# Altium schematic symbol library Ic%.SchLib: 452 symbols (part 5 of 12)
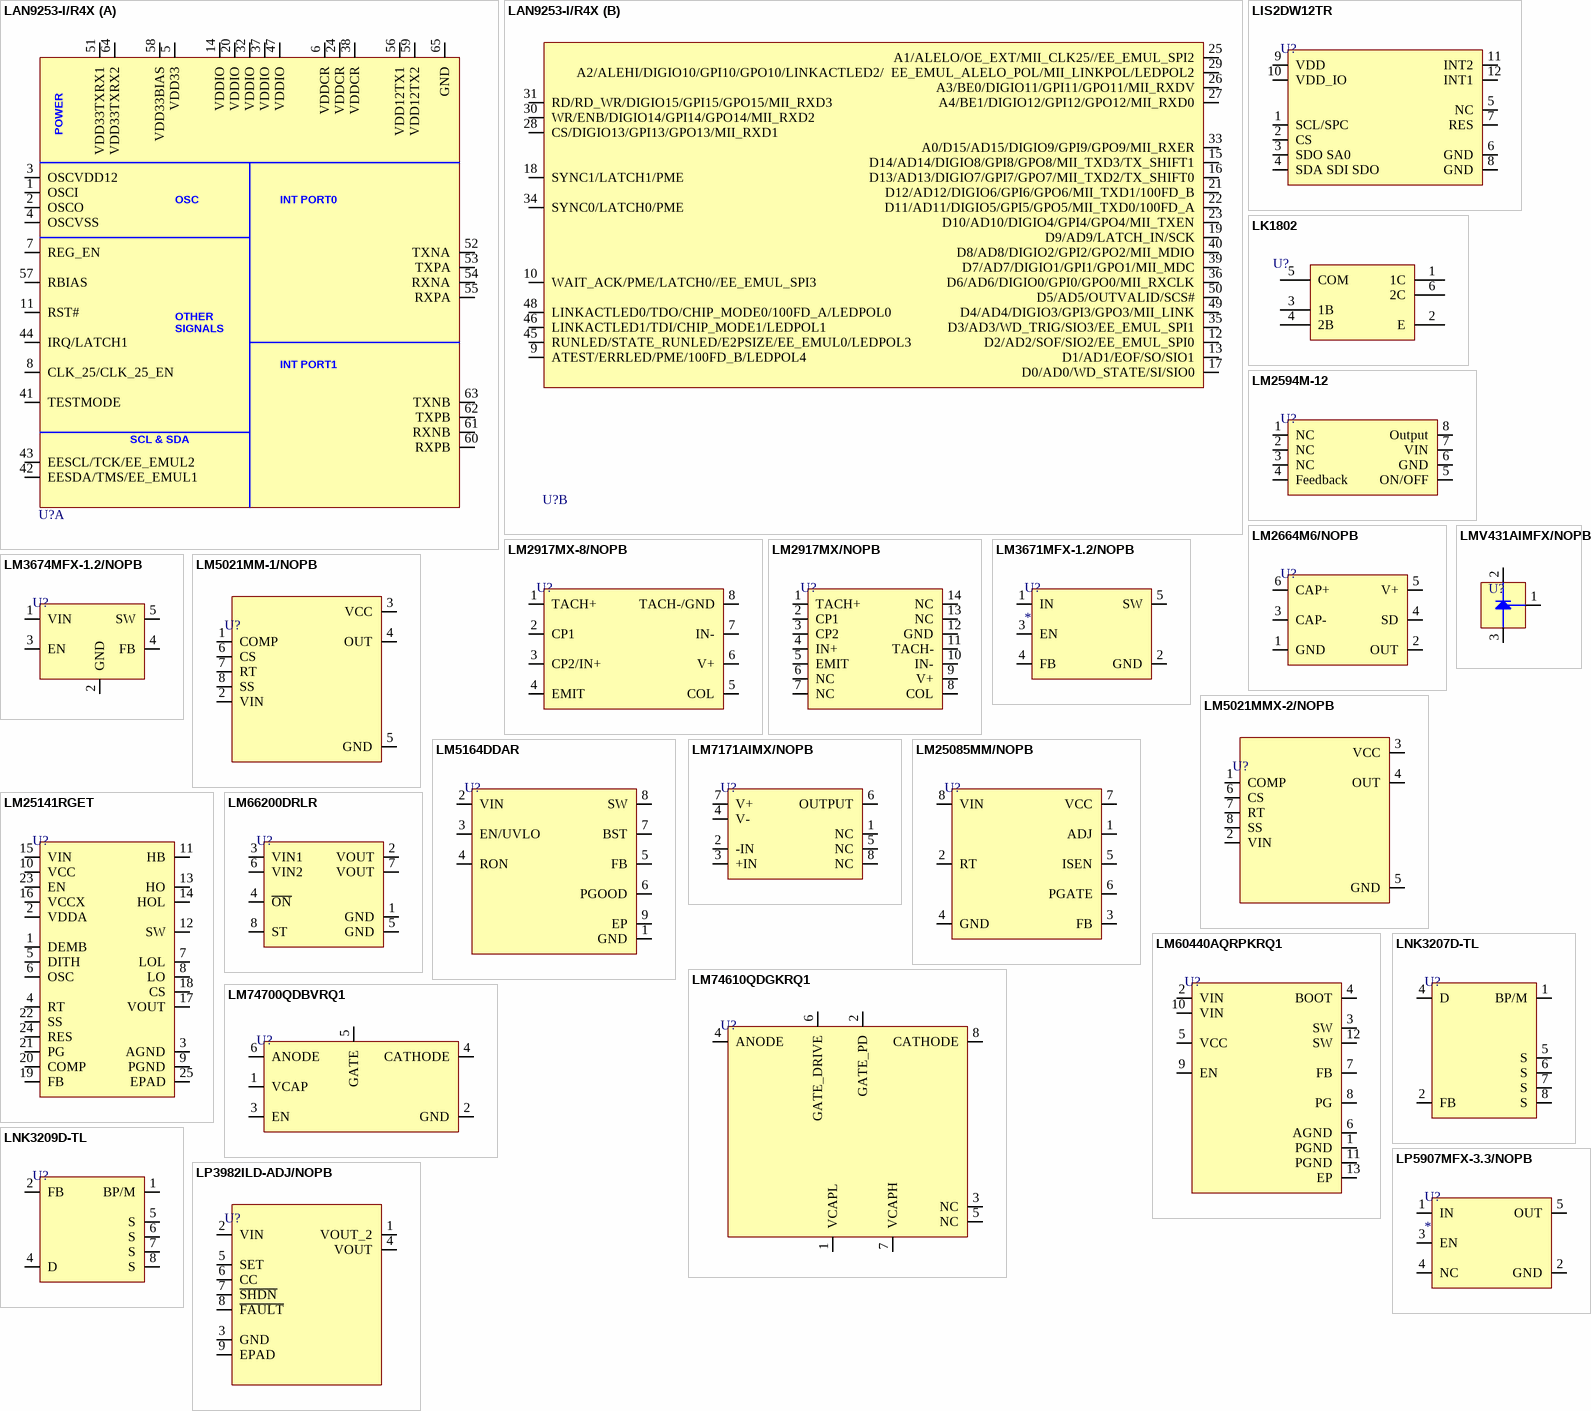
[diagram p27: symbols LAN9253-I/R4X to LP5907MFX-3.3/NOPB]

## LM5021MM-1/NOPB
designator U?
IC OFFLINE SW MULT TOP 8VSSOP; Manufacturer: TI National Semiconductor; Manufacturer Part Number: LM5021MM-1/NOPB; Frequency: 500kHz; Output Voltage: 600mV; Output Current: 100mA; Switching Frequency: 1MHz; Quiescent Current: 2.5mA; Topology: Flyback; Max Supply Voltage: 30V; Min Supply Voltage: 8V; Rise Time: 25ns; Fall Time: 10ns; Duty Cycle: 80%; Nominal Supply Voltage: 15V; Supplier: Mouser; LCSC Part Number: C202233; RoHS: Yes; Item Type: IC; Stock: 1237; Pricing: 1=1.4, 10=1.04, 50=1.04, 100=0.968, 1000=0.887, 10000=0.856 (USD); Mounting Technology: Surface Mount; Case/Package: MSOP; Pins: 8; Min Operating Temperature: -40°C; Max Operating Temperature: 125°C; Packaging: Tape and Reel; Termination: SMD/SMT; Series: -; Thickness: 970um; Reach SVHC Compliant: No; Lead Free: Lead Free; RoHS Compliant: Yes; ComponentLink1URL: https://datasheet.ciiva.com/1513/1771307-1513330.pdf?src-supplier=Element14; ComponentLink1Description: https://datasheet.ciiva.com/1513/1771307-1513330.pdf?src-supplier=Element14; ComponentLink2URL: https://datasheet.ciiva.com/49118/1767118-49118582.pdf?src-supplier=Element14; ComponentLink2Description: https://datasheet.ciiva.com/49118/1767118-49118582.pdf?src-supplier=Element14; ComponentLink3URL: https://datasheet.ciiva.com/49118/1767118-49118263.pdf?src-supplier=Element14; ComponentLink3Description: https://datasheet.ciiva.com/49118/1767118-49118263.pdf?src-supplier=Element14; ComponentLink4URL: https://datasheet.ciiva.com/46389/1888908-46389836.pdf?src-supplier=Element14; ComponentLink4Description: https://datasheet.ciiva.com/46389/1888908-46389836.pdf?src-supplier=Element14; ComponentLink5URL: https://datasheet.ciiva.com/6613/lm5021-6613338.pdf?src-supplier=Digikey; ComponentLink5Description: https://datasheet.ciiva.com/6613/lm5021-6613338.pdf?src-supplier=Digikey; ComponentLink6URL: https://datasheet.ciiva.com/6613/lm5021-6613340.pdf?src-supplier=Digikey; ComponentLink6Description: https://datasheet.ciiva.com/6613/lm5021-6613340.pdf?src-supplier=Digikey; ComponentLink7URL: https://datasheet.ciiva.com/6613/lm5021-6613336.pdf?src-supplier=Digikey; ComponentLink7Description: https://datasheet.ciiva.com/6613/lm5021-6613336.pdf?src-supplier=Digikey
footprint 8-VSSOP (Pitch 0.65mm)(5x3.1mm)
pins: 1 COMP, 2 VIN, 3 VCC, 4 OUT, 5 GND, 6 CS, 7 RT, 8 SS

## LM5021MMX-2/NOPB
designator U?
IC OFFLINE SW MULT TOP 8VSSOP; Manufacturer: TI National Semiconductor; Manufacturer Part Number: LM5021MMX-2/NOPB; Number of Channels: 1NUMBER; Supplier: Mouser; LCSC Part Number: C2865463; RoHS: Yes; Item Type: IC; Stock: 755; Pricing: 1=1.65, 10=1.58, 50=1.46, 100=1.21, 1000=0.859, 10000=0.736 (USD); Length: 3mm; Width: 3mm; Thickness: 970um; Lead Free: 5697LeadFree; ComponentLink1URL: https://datasheet.ciiva.com/12228/snvs359c-123045-12228593.pdf?src-supplier=Mouser; ComponentLink1Description: https://datasheet.ciiva.com/12228/snvs359c-123045-12228593.pdf?src-supplier=Mouser; ComponentLink2URL: https://datasheet.ciiva.com/6612/lm5021-6612842.pdf?src-supplier=Digikey; ComponentLink2Description: https://datasheet.ciiva.com/6612/lm5021-6612842.pdf?src-supplier=Digikey
footprint 8-VSSOP (Pitch 0.65mm)(5x3.1mm)
pins: 1 COMP, 2 VIN, 3 VCC, 4 OUT, 5 GND, 6 CS, 7 RT, 8 SS

## LM5164DDAR
designator U?
IC REG BUCK ADJ 1A 8SOPWR; Manufacturer: Texas Instruments; Manufacturer Part Number: LM5164DDAR; Max Duty Cycle: 99%; Max Supply Voltage: 100V; Min Supply Voltage: 6V; Nominal Supply Current: 600uA; Number of Channels: 1NUMBER; Switching Frequency: 1MHz; Supplier: Mouser; LCSC Part Number: C477928; RoHS: Yes; Item Type: IC; Stock: 1957; Pricing: 1=3.78, 10=3.22, 50=3.22, 100=2.79, 1000=2, 10000=1.88 (USD); Pins: 8NUMBER; Min Operating Temperature: -40°C; Max Operating Temperature: 150°C; Number of Outputs: 1NUMBER; Output Current: 1A; Length: 4.89mm; Width: 3.9mm; Height: 1.7mm; Thickness: 1.48mm
footprint 8-SO-EP_
pins: 1 GND, 2 VIN, 3 EN/UVLO, 4 RON, 5 FB, 6 PGOOD, 7 BST, 8 SW, 9 EP

## LM7171AIMX/NOPB
designator U?
Very High Speed, High Output Current, Voltage Feedback Amplifier 8-SOIC -40 to 85; Manufacturer: TI National Semiconductor; Manufacturer Part Number: LM7171AIMX/NOPB; Item Type: IC; Supplier: Mouser; Supplier Part Number: 926-LM7171AIMX/NOPB; RoHS: Yes; Category: Amplifiers - Op Amps, Buffer, Instrumentation; Stock: 853; Pricing: 1=4.79, 10=4.22, 50=4.22, 100=3.58, 1000=2.61, 10000=2.51 (USD); ComponentLink1URL: https://datasheet.ciiva.com/6627/lm7171-6627136.pdf?src-supplier=Digi-Key; ComponentLink1Description: https://datasheet.ciiva.com/6627/lm7171-6627136.pdf?src-supplier=Digi-Key; ComponentLink2URL: https://datasheet.ciiva.com/6627/lm7171-6627103.pdf?src-supplier=Digi-Key; ComponentLink2Description: https://datasheet.ciiva.com/6627/lm7171-6627103.pdf?src-supplier=Digi-Key
footprint SOIC-8(0.154", 3.90mm Width)
pins: 1 NC, 2 -IN, 3 +IN, 4 V-, 5 NC, 6 OUTPUT, 7 V+, 8 NC

## LM25085MM/NOPB
designator U?
IC REG CTRLR BUCK 8VSSOP; Manufacturer: TI National Semiconductor; Manufacturer Part Number: LM25085MM/NOPB; Supplier: Mouser; Supplier Part Number: 926-LM25085MM/NOPB; RoHS: Yes; Item Type: IC; Stock: 2383; Pricing: 1=2.42, 10=2.06, 50=2.06, 100=1.75, 1000=1.1, 10000=1.03 (USD); ComponentLink1URL: https://datasheet.ciiva.com/6598/lm25085-6598301.pdf?src-supplier=Digikey; ComponentLink1Description: https://datasheet.ciiva.com/6598/lm25085-6598301.pdf?src-supplier=Digikey; ComponentLink2URL: https://datasheet.ciiva.com/6598/lm25085-6598310.pdf?src-supplier=Digikey; ComponentLink2Description: https://datasheet.ciiva.com/6598/lm25085-6598310.pdf?src-supplier=Digikey; LCSC Part Number: C66537
footprint 8-VSSOP (Pitch 0.65mm)(5x3.1mm)
pins: 1 ADJ, 2 RT, 3 FB, 4 GND, 5 ISEN, 6 PGATE, 7 VCC, 8 VIN

## LM25141RGET
designator U?
LOW VOLTAGE LM5141- SYNC BUCK CO; Manufacturer: Texas Instruments; Manufacturer Part Number: LM25141RGET; Item Type: IC; Supplier: Digikey; LCSC Part Number: C2658130; RoHS: Yes; Stock: 976; Pricing: 1=6.33, 10=5.685, 25=5.3744, 100=4.6579 (USD); ComponentLink1URL: http://www.ti.com/lit/ds/symlink/lm25141.pdf?src-supplier=Farnell; ComponentLink1Description: http://www.ti.com/lit/ds/symlink/lm25141.pdf?src-supplier=Farnell; ComponentLink2URL: http://www.ti.com/general/docs/suppproductinfo.tsp?distId=10&gotoUrl=http%3A%2F%2Fwww.ti.com%2Flit%2Fgpn%2Flm25141&src-supplier=Digikey; ComponentLink2Description: http://www.ti.com/general/docs/suppproductinfo.tsp?distId=10&gotoUrl=http%3A%2F%2Fwww.ti.com%2Flit%2Fgpn%2Flm25141&src-supplier=Digikey
footprint 24-WQFN (4x4)
pins: 1 DEMB, 2 VDDA, 3 AGND, 4 RT, 5 DITH, 6 OSC, 7 LOL, 8 LO, 9 PGND, 10 VCC, 11 HB, 12 SW, 13 HO, 14 HOL, 15 VIN, 16 VCCX, 17 VOUT, 18 CS, 19 FB, 20 COMP, 21 PG, 22 SS, 23 EN, 24 RES, 25 EPAD

## LM60440AQRPKRQ1
designator U?
IC REG BUCK ADJ 4A 13WQFN; Manufacturer: Texas Instruments; Manufacturer Part Number: LM60440AQRPKRQ1; Supplier: Mouser; LCSC Part Number: C3187981; RoHS: Yes; Item Type: IC; Stock: 916; Pricing: 1=2.79, 10=1.91, 50=1.91, 100=1.71, 1000=1.52, 10000=1.45 (USD)
footprint 13-WQFN-HR (3x2)
pins: 1 PGND, 2 VIN, 3 SW, 4 BOOT, 5 VCC, 6 AGND, 7 FB, 8 PG, 9 EN, 10 VIN, 11 PGND, 12 SW, 13 EP

## LM66200DRLR
designator U?
OR Controller N+1 ORing Controller N-Channel 2:1 SOT-583; Manufacturer: Texas Instruments; Manufacturer Part Number: LM66200DRLR; Item Type: IC; Supplier 1: Mouser; RoHS: No; Category: Integrated Circuits (ICs); Stock 1: 11717; Pricing 1: 1=0.80000, 10=0.70000, 50=0.65800, 100=0.53700, 1000=0.34000, 10000=0.30700 (USD); Supplier Part Number 1: 595-LM66200DRLR; LCSC Part Number: C3235556
footprint SOT-583
pins: 1 GND, 2 VOUT, 3 VIN1 , 4 ~{ON} , 5 GND, 6 VIN2, 7 VOUT, 8 ST

## LM74610QDGKRQ1
designator U?
IC SMART DIODE CTLR 8VSSOP; Manufacturer: Texas Instruments; Manufacturer Part Number: LM74610QDGKRQ1; Quiescent Current: 0pA; Operating Supply Current: 0A; Supplier: Mouser; Supplier Part Number: 595-LM74610QDGKRQ1; RoHS: Yes; Category: Power Management ICs; Stock: 4920; Pricing: 1=2.47, 10=2.1, 50=2.1, 100=1.79, 1000=1.2, 10000=1.08 (USD); Mounting Technology: Surface Mount; Case/Package: VSSOP; Pins: 8; Weight: 0.005997oz; Min Operating Temperature: -40°C; Max Operating Temperature: 125°C; Packaging: Cut Tape; Series: Automotive, AEC-Q100; Package Quantity: 2500; Lead Free: Lead Free; RoHS Compliant: Yes; ComponentLink1URL: http://www.ti.com/lit/ds/symlink/lm74610-q1.pdf?src-supplier=Digikey; ComponentLink1Description: http://www.ti.com/lit/ds/symlink/lm74610-q1.pdf?src-supplier=Digikey; Item Type: IC
footprint 8-VSSOP (Pitch 0.65mm)(5x3.1mm)
pins: 1 VCAPL, 2 GATE_PD, 3 NC, 4 ANODE, 5 NC, 6 GATE_DRIVE, 7 VCAPH, 8 CATHODE

## LM74700QDBVRQ1
designator U?
OR Controller N+1 ORing Controller N-Channel 1:1 SOT-23-6; Manufacturer: Texas Instruments; Manufacturer Part Number: LM74700QDBVRQ1; Max Output current: 5A; Turn-On Delay Time: 1.4us; Turn-Off Delay Time: 450ns; Max Supply Voltage: 65V; Min Supply Voltage: 3.2V; Nominal Supply Current: 80uA; Number of Outputs: 1NUMBER; Item Type: IC; Supplier: Mouser; Supplier Part Number: 595-LM74700QDBVRQ1; RoHS: Yes; Category: Power Management ICs; Stock: 11505; Pricing: 1=1.78, 10=1.6, 50=1.6, 100=1.28, 1000=0.877, 10000=0.756 (USD); Mounting Technology: Surface Mount; Case/Package: SOT-23-6; Pins: 6NUMBER; Min Operating Temperature: -40°C; Max Operating Temperature: 125°C; Series: Automotive, AEC-Q100; Length: 2.9mm; Width: 1.6mm; Height: 1.45mm; Thickness: 1.2mm; RoHS Compliant: Yes; ComponentLink1URL: http://www.ti.com/general/docs/suppproductinfo.tsp?distId=10&amp;gotoUrl=http%3A%2F%2Fwww.ti.com%2Flit%2Fgpn%2Flm74700-q1&src-supplier=Digikey; ComponentLink1Description: http://www.ti.com/general/docs/suppproductinfo.tsp?distId=10&amp;gotoUrl=http%3A%2F%2Fwww.ti.com%2Flit%2Fgpn%2Flm74700-q1&src-supplier=Digikey; LCSC Part Number: C2941042
footprint SOT-23-6
pins: 1 VCAP, 2 GND, 3 EN, 4 CATHODE, 5 GATE, 6 ANODE

## LMV431AIMFX/NOPB
designator U?
IC VREF SHUNT ADJ 1% SOT23-3; Manufacturer: TI National Semiconductor; Manufacturer Part Number: LMV431AIMFX/NOPB; Supplier: Mouser; LCSC Part Number: C478069; RoHS: Yes; Item Type: IC; Stock: 22360; Pricing: 1=0.68, 10=0.561, 50=0.561, 100=0.425, 1000=0.29, 10000=0.24 (USD); ComponentLink1URL: https://datasheet.ciiva.com/2012/lmv431-2012949.pdf?src-supplier=Digikey; ComponentLink1Description: https://datasheet.ciiva.com/2012/lmv431-2012949.pdf?src-supplier=Digikey; ComponentLink2URL: https://datasheet.ciiva.com/2012/lmv431-2012950.pdf?src-supplier=Digikey; ComponentLink2Description: https://datasheet.ciiva.com/2012/lmv431-2012950.pdf?src-supplier=Digikey; ComponentLink3URL: https://datasheet.ciiva.com/6596/lmv431-6596021.pdf?src-supplier=Digikey; ComponentLink3Description: https://datasheet.ciiva.com/6596/lmv431-6596021.pdf?src-supplier=Digikey; ComponentLink4URL: https://datasheet.ciiva.com/46424/1841927-46424699.pdf?src-supplier=Element14; ComponentLink4Description: https://datasheet.ciiva.com/46424/1841927-46424699.pdf?src-supplier=Element14
footprint SOT-23 (TRANS NPN 40V 0.6A SOT23)
pins: 1 REF, 2 Cathode, 3 Anode

## LNK3207D-TL
designator U?
IC OFFLINE SWITCH MULT TOP 8SO; Manufacturer: Power Integrations; Manufacturer Part Number: LNK3207D-TL; Supplier: Rs; Supplier Part Number: 2232976; RoHS: No; Category: Voltage Regulators - Switching; Stock: 240; Pricing: 5=1.206, 50=1.026, 100=0.864, 250=0.818, 1000=0.594 (GBP); Item Type: IC
footprint SO-8C
pins: 1 BP/M, 2 FB, 4 D, 5 S, 6 S, 7 S, 8 S

## LNK3209D-TL
designator U?
600 MA (MDCM) 1000 MA (CCM); Manufacturer: Power Integrations; Manufacturer Part Number: LNK3209D-TL; Supplier: Future Electronics; Supplier Part Number: 5168941; RoHS: No; Category: Uncategorized; Stock: 10; Pricing: 1=0.825, 15=0.74, 75=0.695, 250=0.665, 1250=0.61 (USD)
footprint SO-8C
pins: 1 BP/M, 2 FB, 4 D, 5 S, 6 S, 7 S, 8 S

## LP3982ILD-ADJ/NOPB
designator U?
IC REG LIN POS ADJ 300MA 8WSON; Manufacturer: TI National Semiconductor; Manufacturer Part Number: LP3982ILD-ADJ/NOPB; Item Type: Voltage Regulators - Linear; Supplier: Mouser; LCSC Part Number: C2868888; RoHS: Yes; Stock: 6952; Pricing: 1=0.57, 10=0.509, 50=0.509, 100=0.434, 1000=0.359, 10000=0.33 (USD); ComponentLink1URL: https://datasheet.ciiva.com/15111/getdatasheetpartid-121267-15111861.pdf?src-supplier=Verical; ComponentLink1Description: https://datasheet.ciiva.com/15111/getdatasheetpartid-121267-15111861.pdf?src-supplier=Verical; ComponentLink2URL: https://datasheet.ciiva.com/4886/snvs185c-123114-4886512.pdf?src-supplier=Mouser; ComponentLink2Description: https://datasheet.ciiva.com/4886/snvs185c-123114-4886512.pdf?src-supplier=Mouser; ComponentLink3URL: https://datasheet.ciiva.com/25626/0900766b810fa762-25626726.pdf?src-supplier=Rs; ComponentLink3Description: https://datasheet.ciiva.com/25626/0900766b810fa762-25626726.pdf?src-supplier=Rs; ComponentLink4URL: https://datasheet.ciiva.com/6579/lp3982-6579861.pdf?src-supplier=Digikey; ComponentLink4Description: https://datasheet.ciiva.com/6579/lp3982-6579861.pdf?src-supplier=Digikey; ComponentLink5URL: https://datasheet.ciiva.com/6579/lp3982-6579862.pdf?src-supplier=Digikey; ComponentLink5Description: https://datasheet.ciiva.com/6579/lp3982-6579862.pdf?src-supplier=Digikey; ComponentLink6URL: https://datasheet.ciiva.com/22732/1771562-22732394.pdf?src-supplier=Farnell; ComponentLink6Description: https://datasheet.ciiva.com/22732/1771562-22732394.pdf?src-supplier=Farnell; ComponentLink7URL: https://datasheet.ciiva.com/22678/1849842-22678007.pdf?src-supplier=Element14; ComponentLink7Description: https://datasheet.ciiva.com/22678/1849842-22678007.pdf?src-supplier=Element14; ComponentLink8URL: https://datasheet.ciiva.com/46384/1874654-46384191.pdf?src-supplier=Element14; ComponentLink8Description: https://datasheet.ciiva.com/46384/1874654-46384191.pdf?src-supplier=Element14
footprint 8-WSON (3x2.5)
pins: 1 VOUT_2, 2 VIN, 3 GND, 4 VOUT, 5 SET, 6 CC, 7 ~{SHDN}, 8 ~{FAULT}, 9 EPAD

## LP5907MFX-3.3/NOPB
designator U?
LDO Regulator Pos 3.3V 0.25A 5-Pin SOT-23 T/R; Manufacturer: Texas Instruments; Manufacturer Part Number: LP5907MFX-3.3/NOPB; Number of Outputs: 1; Min Input Voltage: 2.2V; Max Supply Voltage: 5.5V; Max Output current: 250mA; Dropout Voltage: 250mV; Polarity: Positive; Quiescent Current: 25uA; Accuracy: 2%; Power Supply Rejection Ratio (PSRR): 60dB; Output Type: Fixed; Max Supply Current: 425uA; Nominal Supply Current: 12uA; Number of Channels: 1NUMBER; Item Type: IC; Supplier: Digikey; Supplier Part Number: 296-38557-1-ND; RoHS: Yes; Category: Voltage Regulators - Linear; Stock: 22318; Pricing: 1=0.6, 10=0.512, 25=0.478, 100=0.3823, 250=0.35496, 500=0.30034, 1000=0.23209 (USD); Mounting Technology: Surface Mount; Case/Package: SOT-23-5; Pins: 5; Min Operating Temperature: -40°C; Max Operating Temperature: 125°C; Output Voltage: 3.3V; Packaging: Tape and Reel; Output Current: 250mA; Package Quantity: 3000; Number of Regulators: 1; Nominal Output Voltage: 3.3V; Series: -; Output Configuration: Positive; Min Supply Voltage: 2.2V; Length: 2.9mm; Width: 1.6mm; Height: 1.45mm; Thickness: 1.2mm; Radiation Hardening: No; Reach SVHC Compliant: No; Lead Free: Lead Free; RoHS Compliant: Yes; ComponentLink1URL: https://datasheet.ciiva.com/48475/lp5907-48475084.pdf?src-supplier=Avnet; ComponentLink1Description: https://datasheet.ciiva.com/48475/lp5907-48475084.pdf?src-supplier=Avnet; Package: SOT-23-5; JLCPCB Part Number: C80670; ComponentLink2Description: JLCPCB; ComponentLink2URL: https://jlcpcb.com/partdetail/TexasInstruments-LP5907MFX_3_3NOPB/C80670
footprint SOT-23-5
pins: 1 IN, 2 GND, 3 EN, 4 NC, 5 OUT

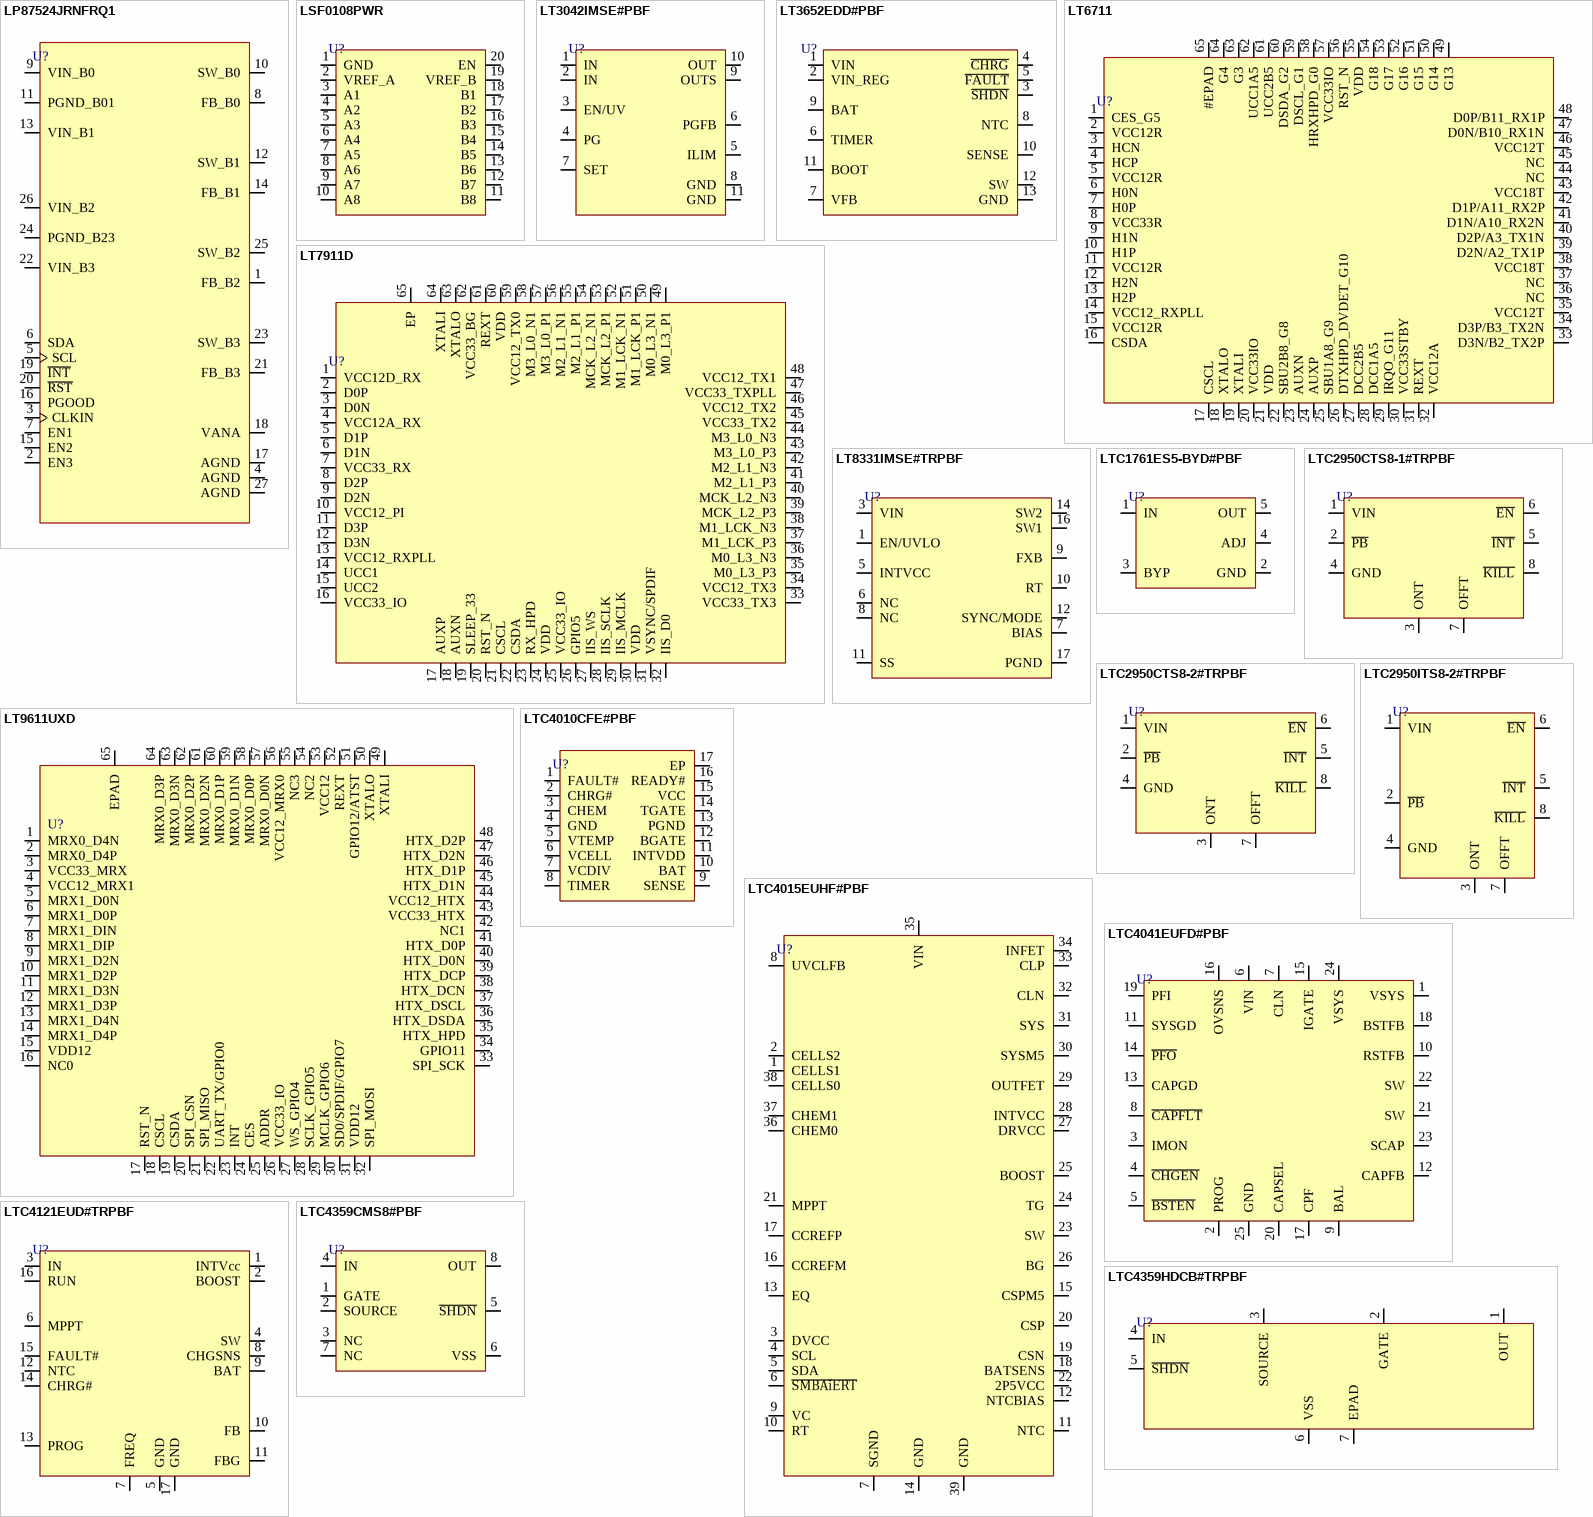
[diagram p9: symbols LP87524JRNFRQ1 to LTC4359HDCB#TRPBF]

## LP87524JRNFRQ1
designator U?
IC REG BUCK ADJ QUAD 26VQFN; Manufacturer: Texas Instruments; Manufacturer Part Number: LP87524JRNFRQ1; Supplier: Mouser; Supplier Part Number: 595-LP87524JRNFRQ1; RoHS: Yes; Item Type: IC; Stock: 3780; Pricing: 1=5.94, 10=5.2, 50=5.2, 100=4.37, 1000=3.14, 10000=2.91 (USD); Pins: 26NUMBER; Thickness: 900um; ComponentLink1URL: http://www.ti.com/general/docs/suppproductinfo.tsp?distId=10&amp;gotoUrl=http%3A%2F%2Fwww.ti.com%2Flit%2Fgpn%2Flp87524j-q1&src-supplier=Digikey; ComponentLink1Description: http://www.ti.com/general/docs/suppproductinfo.tsp?distId=10&amp;gotoUrl=http%3A%2F%2Fwww.ti.com%2Flit%2Fgpn%2Flp87524j-q1&src-supplier=Digikey
footprint 26-VQFN-HR (4.5x4) (QFN, 26-Leads, Body 4x4.5mm, Pitch 0.5mm)
pins: 1 FB_B2, 2 EN3, 3 CLKIN, 4 AGND, 5 SCL, 6 SDA, 7 EN1, 8 FB_B0, 9 VIN_B0, 10 SW_B0, 11 PGND_B01, 12 SW_B1, 13 VIN_B1, 14 FB_B1, 15 EN2, 16 PGOOD, 17 AGND, 18 VANA, 19 ~{INT}, 20 ~{RST}, 21 FB_B3, 22 VIN_B3, 23 SW_B3, 24 PGND_B23, 25 SW_B2, 26 VIN_B2, 27 AGND

## LSF0108PWR
designator U?
IC TRANSLATOR BIDIR 20TSSOP; Manufacturer: Texas Instruments; Manufacturer Part Number: LSF0108PWR; Nominal Supply Current: 1uA; Number of Outputs: 8NUMBER; Supplier: Mouser; Supplier Part Number: 595-LSF0108PWR; RoHS: Yes; Category: Voltage Level Shifters; Stock: 19993; Pricing: 1=1.2, 10=1.03, 50=1.03, 100=0.788, 1000=0.541, 10000=0.479 (USD); Length: 6.5mm; Width: 4.4mm; Height: 1.2mm; Thickness: 1mm; ComponentLink1URL: http://components.arrow.com/part/dataview/66677138S976706N9193?src-supplier=Arrow+Electronics; ComponentLink1Description: http://components.arrow.com/part/dataview/66677138S976706N9193?src-supplier=Arrow+Electronics; ComponentLink2URL: http://www.ti.com/general/docs/lit/getliterature.tsp?genericPartNumber=LSF0101&&fileType=pdf&src-supplier=Avnet; ComponentLink2Description: http://www.ti.com/general/docs/lit/getliterature.tsp?genericPartNumber=LSF0101&&fileType=pdf&src-supplier=Avnet; ComponentLink3URL: http://www.ti.com/lit/ds/symlink/lsf0108.pdf?src-supplier=Digi-Key; ComponentLink3Description: http://www.ti.com/lit/ds/symlink/lsf0108.pdf?src-supplier=Digi-Key; ComponentLink4URL: http://www.ti.com/lit/gpn/lsf0108?src-supplier=Mouser; ComponentLink4Description: http://www.ti.com/lit/gpn/lsf0108?src-supplier=Mouser; LCSC Part Number: C190219; Item Type: IC
footprint TSSOP-20
pins: 1 GND, 2 VREF_A, 3 A1, 4 A2, 5 A3, 6 A4, 7 A5, 8 A6, 9 A7, 10 A8, 11 B8, 12 B7, 13 B6, 14 B5, 15 B4, 16 B3, 17 B2, 18 B1, 19 VREF_B, 20 EN

## LT3042IMSE#PBF
designator U?
IC REG LIN POS ADJ 200MA 10MSOP; Manufacturer: Analog Devices / Linear Technology; Manufacturer Part Number: LT3042IMSE#PBF; Supplier: Mouser; Supplier Part Number: 584-LT3042IMSE#PBF; RoHS: Yes; Item Type: IC; Stock: 18453; Pricing: 1=6.55, 10=5.91, 50=5.75, 100=5.09, 1000=4.11, 10000=4.11 (USD); ComponentLink1URL: http://www.farnell.com/datasheets/1941078.pdf?src-supplier=Farnell; ComponentLink1Description: http://www.farnell.com/datasheets/1941078.pdf?src-supplier=Farnell; ComponentLink2URL: https://datasheet.octopart.com/LT3042IMSE%23PBF-Linear-Technology-datasheet-41232635.pdf?src-supplier=Farnell; ComponentLink2Description: https://datasheet.octopart.com/LT3042IMSE%23PBF-Linear-Technology-datasheet-41232635.pdf?src-supplier=Farnell; ComponentLink3URL: https://datasheet.octopart.com/LT3042IMSE%23PBF-Analog-Devices-datasheet-138896359.pdf?src-supplier=Element14; ComponentLink3Description: https://datasheet.octopart.com/LT3042IMSE%23PBF-Analog-Devices-datasheet-138896359.pdf?src-supplier=Element14; ComponentLink4URL: http://www.linear.com/docs/55649?src-supplier=Digikey; ComponentLink4Description: http://www.linear.com/docs/55649?src-supplier=Digikey
footprint 10-MSOP-EP
pins: 1 IN, 2 IN, 3 EN/UV, 4 PG, 5 ILIM, 6 PGFB, 7 SET, 8 GND, 9 OUTS, 10 OUT, 11 GND

## LT3652EDD#PBF
designator U?
Battery Charger Li-Ion 2000mA 4.2V Automotive 12-Pin DFN EP; Manufacturer: Analog Devices / Linear Technology; Manufacturer Part Number: LT3652EDD#PBF; Max Supply Voltage: 32V; Min Supply Voltage: 4.95V; Output Current: 2mA; Max Output Current: 2A; ComponentLink1URL: http://www.mouser.com/ds/2/445/7447779122-538892.pdf?src-supplier=Mouser; ComponentLink1Description: http://www.mouser.com/ds/2/445/7447779122-538892.pdf?src-supplier=Mouser; ComponentLink2URL: http://katalog.we-online.de/pbs/datasheet/7447779122.pdf?src-supplier=Digi-Key; ComponentLink2Description: http://katalog.we-online.de/pbs/datasheet/7447779122.pdf?src-supplier=Digi-Key; Supplier 1: Digi-Key; RoHS: Yes; Category: Battery Management; Stock 1: 1554; Pricing 1: 1=7.32000, 10=6.60900, 25=6.30160, 100=5.47170, 250=5.22580, 500=4.76470, 1000=4.35000 (USD); Mount: Surface Mount; Case/Package: DFN; Number of Pins: 12; Min Operating Temperature: -40°C; Max Operating Temperature: 125°C; Package Quantity: 121; Packaging: Rail/Tube; Series: -; Output Voltage: 4.2V; Max Output Voltage: 4.2V; Max Charge Current: 2A; Length: 3mm; Width: 3mm; Height: 0.7mm; Radiation Hardening: No; REACH SVHC: No SVHC; RoHS Compliant: Yes; ComponentLink3URL: https://datasheet.ciiva.com/1138/1692510-1138257.pdf?src-supplier=Element14; ComponentLink3Description: https://datasheet.ciiva.com/1138/1692510-1138257.pdf?src-supplier=Element14; ComponentLink4URL: https://datasheet.ciiva.com/14093/lt3652-eng-ds-14093922.pdf?src-supplier=Distrelec; ComponentLink4Description: https://datasheet.ciiva.com/14093/lt3652-eng-ds-14093922.pdf?src-supplier=Distrelec; ComponentLink5URL: https://datasheet.ciiva.com/15114/getdatasheetpartid-368876-15114676.pdf?src-supplier=Verical; ComponentLink5Description: https://datasheet.ciiva.com/15114/getdatasheetpartid-368876-15114676.pdf?src-supplier=Verical; ComponentLink6URL: https://datasheet.ciiva.com/30477/0900766b812525a8-30477820.pdf?src-supplier=RSComponents; ComponentLink6Description: https://datasheet.ciiva.com/30477/0900766b812525a8-30477820.pdf?src-supplier=RSComponents; ComponentLink7URL: https://datasheet.ciiva.com/1144/3652fd-1144158.pdf?src-supplier=Newark; ComponentLink7Description: https://datasheet.ciiva.com/1144/3652fd-1144158.pdf?src-supplier=Newark; ComponentLink8URL: https://datasheet.ciiva.com/26874/lt3652edd-pbf-26874578.pdf?src-supplier=IIIC; ComponentLink8Description: https://datasheet.ciiva.com/26874/lt3652edd-pbf-26874578.pdf?src-supplier=IIIC; ComponentLink9URL: https://datasheet.ciiva.com/1496/1692510-1496793.pdf?src-supplier=Farnell; ComponentLink9Description: https://datasheet.ciiva.com/1496/1692510-1496793.pdf?src-supplier=Farnell; ComponentLink10URL: https://datasheet.ciiva.com/22642/1684150-22642988.pdf?src-supplier=Element14; ComponentLink10Description: https://datasheet.ciiva.com/22642/1684150-22642988.pdf?src-supplier=Element14; ComponentLink11URL: https://datasheet.ciiva.com/22647/1692510-22647788.pdf?src-supplier=Farnell; ComponentLink11Description: https://datasheet.ciiva.com/22647/1692510-22647788.pdf?src-supplier=Farnell; ComponentLink12URL: https://datasheet.ciiva.com/1932/28522-1932094.pdf?src-supplier=Digi-Key; ComponentLink12Description: https://datasheet.ciiva.com/1932/28522-1932094.pdf?src-supplier=Digi-Key; Supplier Part Number 1: LT3652EDD#PBF-ND; LCSC Part Number: C96510
footprint 12-DFN (3x3)
pins: 1 VIN, 2 VIN_REG, 3 ~{SHDN}, 4 ~{CHRG}, 5 ~{FAULT}, 6 TIMER, 7 VFB, 8 NTC, 9 BAT, 10 SENSE, 11 BOOT, 12 SW, 13 GND

## LT6711
designator U?
HD-DVI2.0 to DP1.2 with Type-C; Manufacturer: Lontium; Manufacturer Part Number: LT6711; Item Type: IC; Package: QFN 64 (7.5x7.5); LCSC Part Number: -; ComponentLink1Description: LCSC; ComponentLink1URL: *
footprint QFN 64 (7.5x7.5)
pins: 1 CES_G5, 2 VCC12R, 3 HCN, 4 HCP, 5 VCC12R, 6 H0N, 7 H0P, 8 VCC33R, 9 H1N, 10 H1P, 11 VCC12R, 12 H2N, 13 H2P, 14 VCC12_RXPLL, 15 VCC12R, 16 CSDA, 17 CSCL, 18 XTALO, 19 XTALI, 20 VCC33IO, 21 VDD, 22 SBU2B8_G8, 23 AUXN, 24 AUXP, 25 SBU1A8_G9, 26 DTXHPD_DVDET_G10, 27 DCC2B5, 28 DCC1A5, 29 IRQO_G11, 30 VCC33STBY, 31 REXT, 32 VCC12A, 33 D3N/B2_TX2P, 34 D3P/B3_TX2N, 35 VCC12T, 36 NC, 37 NC, 38 VCC18T, 39 D2N/A2_TX1P, 40 D2P/A3_TX1N, 41 D1N/A10_RX2N, 42 D1P/A11_RX2P, 43 VCC18T, 44 NC, 45 NC, 46 VCC12T, 47 D0N/B10_RX1N, 48 D0P/B11_RX1P, 49 G13, 50 G14, 51 G15, 52 G16, 53 G17, 54 G18, 55 VDD, 56 RST_N, 57 VCC33IO, 58 HRXHPD_G0, 59 DSCL_G1, 60 DSDA_G2, 61 UCC2B5, 62 UCC1A5, 63 G3, 64 G4, 65 #EPAD

## LT7911D
designator U?
5.4Gbps Type-C/DP/eDPToDual-port MIPI DSI/CSI/LVDS with Audio QFN-64(7.5x7.5) Video Interface ICs ROHS; Manufacturer: LONTIUM SEMICONDUCTOR; Manufacturer Part Number: LT7911D; Item Type: IC; Package: QFN-64(7.5x7.5); LCSC Part Number: C5310990; ComponentLink1Description: LCSC; ComponentLink1URL: https://jlcpcb.com/partdetail/LontiumSemiconductor-LT7911D/C5310990
footprint QFN-64-EP(7.5x7.5)
pins: 1 VCC12D_RX, 2 D0P, 3 D0N, 4 VCC12A_RX, 5 D1P, 6 D1N, 7 VCC33_RX, 8 D2P, 9 D2N, 10 VCC12_PI, 11 D3P, 12 D3N, 13 VCC12_RXPLL, 14 UCC1, 15 UCC2, 16 VCC33_IO, 17 AUXP, 18 AUXN, 19 SLEEP_33, 20 RST_N, 21 CSCL, 22 CSDA, 23 RX_HPD, 24 VDD, 25 VCC33_IO, 26 GPIO5, 27 IIS_WS, 28 IIS_SCLK, 29 IIS_MCLK, 30 VDD, 31 VSYNC/SPDIF, 32 IIS_D0, 33 VCC33_TX3, 34 VCC12_TX3, 35 M0_L3_P3, 36 M0_L3_N3, 37 M1_LCK_P3, 38 M1_LCK_N3, 39 MCK_L2_P3, 40 MCK_L2_N3, 41 M2_L1_P3, 42 M2_L1_N3, 43 M3_L0_P3, 44 M3_L0_N3, 45 VCC33_TX2, 46 VCC12_TX2, 47 VCC33_TXPLL, 48 VCC12_TX1, 49 M0_L3_P1, 50 M0_L3_N1, 51 M1_LCK_P1, 52 M1_LCK_N1, 53 MCK_L2_P1, 54 MCK_L2_N1, 55 M2_L1_P1, 56 M2_L1_N1, 57 M3_L0_P1, 58 M3_L0_N1, 59 VCC12_TX0, 60 VDD, 61 REXT, 62 VCC33_BG, 63 XTALO, 64 XTALI, 65 EP

## LT8331IMSE#TRPBF
designator U?
IC REG MULTI CONFG ADJ 16MSOP; Manufacturer: Analog Devices; Manufacturer Part Number: LT8331IMSE#TRPBF; Package: MSOP-12; LCSC Part Number: C673751; ComponentLink1Description: LCSC; ComponentLink1URL: https://www.lcsc.com/product-detail/DC-DC-Converters_Analog-Devices-LT8331IMSE-TRPBF_C673751.html; Item Type: IC
footprint 16-MSOP-EP
pins: 1 EN/UVLO, 3 VIN, 5 INTVCC, 6 NC, 7 BIAS, 8 NC, 9 FXB, 10 RT, 11 SS, 12 SYNC/MODE, 14 SW2, 16 SW1, 17 PGND

## LT9611UXD
designator U?
Dual-Port MIPI to HD-DVI2.0 Converter; Manufacturer: LONTIUM SEMICONDUCTOR; Manufacturer Part Number: LT9611UXD; Item Type: IC; Package: QFN-64-EP(7.5x7.5)
footprint QFN-64-EP(7.5x7.5)
pins: 1 MRX0_D4N, 2 MRX0_D4P, 3 VCC33_MRX, 4 VCC12_MRX1, 5 MRX1_D0N, 6 MRX1_D0P, 7 MRX1_DIN, 8 MRX1_DIP, 9 MRX1_D2N, 10 MRX1_D2P, 11 MRX1_D3N, 12 MRX1_D3P, 13 MRX1_D4N, 14 MRX1_D4P, 15 VDD12, 16 NC0, 17 RST_N, 18 CSCL, 19 CSDA, 20 SPI_CSN, 21 SPI_MISO, 22 UART_TX/GPIO0, 23 INT, 24 CES, 25 ADDR, 26 VCC33_IO, 27 WS_GPIO4, 28 SCLK_GPIO5, 29 MCLK_GPIO6, 30 SD0/SPDIF/GPIO7, 31 VDD12, 32 SPI_MOSI, 33 SPI_SCK, 34 GPIO11, 35 HTX_HPD, 36 HTX_DSDA, 37 HTX_DSCL, 38 HTX_DCN, 39 HTX_DCP, 40 HTX_D0N, 41 HTX_D0P, 42 NC1, 43 VCC33_HTX, 44 VCC12_HTX, 45 HTX_D1N, 46 HTX_D1P, 47 HTX_D2N, 48 HTX_D2P, 49 XTALI, 50 XTALO, 51 GPIO12/ATST, 52 REXT, 53 VCC12, 54 NC2, 55 NC3, 56 VCC12_MRX0, 57 MRX0_D0N, 58 MRX0_D0P, 59 MRX0_D1N, 60 MRX0_D1P, 61 MRX0_D2N, 62 MRX0_D2P, 63 MRX0_D3N, 64 MRX0_D3P, 65 EPAD

## LTC1761ES5-BYD#PBF
designator U?
65dB@(120Hz) 100mA Adjustable 1.22V~20V Positive electrode 20V TSOT-23-5 Voltage Regulators - Linear, Low Drop Out (LDO) Regulators ROHS; Manufacturer: Analog Device; Manufacturer Part Number: LTC1761ES5-BYD#PBF; Item Type: IC; Package: TSOT-23-5; LCSC Part Number: C117228; ComponentLink1Description: LCSC; ComponentLink1URL: https://www.lcsc.com/product-detail/Voltage-Regulators-Linear-Low-Drop-Out-LDO-Regulators_Analog-Devices-LTC1761ES5-BYD-PBF_C117228.html
footprint TSOT-23-5
pins: 1 IN, 2 GND, 3 BYP, 4 ADJ, 5 OUT

## LTC2950CTS8-1#TRPBF
designator U?
IC PB ON/OFF CONTROLLER TSOT23-8; Manufacturer: Analog Devices / Linear Technology; Manufacturer Part Number: LTC2950CTS8-1#TRPBF; Min Input Voltage: 2.7V; Max Supply Voltage: 26.4V; Input Capacitance: 1.5nF; Operating Supply Current: 6uA; Threshold Voltage: 600mV; Supplier: Mouser; LCSC Part Number: C462677; RoHS: Yes; Item Type: IC; Stock: 4; Pricing: 1=5.86, 10=4.98, 50=4.98, 100=4.31, 1000=3.1, 10000=2.81 (USD); Case/Package: TSOT; Pins: 8; Min Operating Temperature: 0°C; Max Operating Temperature: 70°C; Package Quantity: 2500; Min Supply Voltage: 2.7V; Packaging: Tape and Reel; Supply Current: 6uA; Length: 2.9mm; Reach SVHC Compliant: No; RoHS Compliant: Yes; ComponentLink1URL: https://datasheet.ciiva.com/1568/1605146-1568809.pdf?src-supplier=Farnell; ComponentLink1Description: https://datasheet.ciiva.com/1568/1605146-1568809.pdf?src-supplier=Farnell; ComponentLink2URL: https://datasheet.ciiva.com/1511/1605146-1511273.pdf?src-supplier=Element14; ComponentLink2Description: https://datasheet.ciiva.com/1511/1605146-1511273.pdf?src-supplier=Element14; ComponentLink3URL: https://datasheet.ciiva.com/1143/1605146-1143882.pdf?src-supplier=Farnell; ComponentLink3Description: https://datasheet.ciiva.com/1143/1605146-1143882.pdf?src-supplier=Farnell; ComponentLink4URL: https://datasheet.ciiva.com/1141/1605146-1141188.pdf?src-supplier=Element14; ComponentLink4Description: https://datasheet.ciiva.com/1141/1605146-1141188.pdf?src-supplier=Element14; ComponentLink5URL: https://datasheet.ciiva.com/25590/1605146-25590575.pdf?src-supplier=Newark; ComponentLink5Description: https://datasheet.ciiva.com/25590/1605146-25590575.pdf?src-supplier=Newark; ComponentLink6URL: https://datasheet.ciiva.com/1967/7377-1967610.pdf?src-supplier=Digikey; ComponentLink6Description: https://datasheet.ciiva.com/1967/7377-1967610.pdf?src-supplier=Digikey
footprint TSOT-23-8
pins: 1 VIN, 2 ~{PB}, 3 ONT, 4 GND, 5 ~{INT}, 6 ~{EN}, 7 OFFT, 8 ~{KILL}

## LTC2950CTS8-2#TRPBF
designator U?
IC PB ON/OFF CONTROLLER TSOT23-8; Manufacturer: Analog Devices / Linear Technology; Manufacturer Part Number: LTC2950CTS8-2#TRPBF; Operating Supply Current: 6uA; Supplier: Digikey; LCSC Part Number: C462646; RoHS: Yes; Item Type: IC; Pricing: 2500=2.7375 (USD); Case/Package: SOT-23-8; Pins: 8; Min Operating Temperature: 0°C; Max Operating Temperature: 70°C; Package Quantity: 2500; Packaging: Tape and Reel; Length: 2.9mm; RoHS Compliant: Yes; ComponentLink1URL: https://datasheet.ciiva.com/1967/7377-1967611.pdf?src-supplier=Digikey; ComponentLink1Description: https://datasheet.ciiva.com/1967/7377-1967611.pdf?src-supplier=Digikey
footprint TSOT-23-8
pins: 1 VIN, 2 ~{PB}, 3 ONT, 4 GND, 5 ~{INT}, 6 ~{EN}, 7 OFFT, 8 ~{KILL}

## LTC2950ITS8-2#TRPBF
designator U?
IC Pb On/off Controller TSOT23-8; Manufacturer: Analog Devices / Linear Technology; Manufacturer Part Number: LTC2950ITS8-2#TRPBF; Operating Supply Current: 6uA; Supplier 1: Mouser; RoHS: Yes; Category: Integrated Circuits (ICs); Stock 1: 260; Pricing 1: 1=6.42, 10=5.8, 50=5.53, 100=4.8, 1000=3.76, 10000=3.62 (USD); Case/Package: SOT-23-8; Number of Pins: 8; Min Operating Temperature: -40°C; Max Operating Temperature: 85°C; Package Quantity: 2500; Packaging: Tape and Reel; Series: -; Length: 2.9mm; RoHS Compliant: Yes; ComponentLink1URL: https://datasheet.ciiva.com/1967/7377-1967658.pdf?src-supplier=Digi-Key; ComponentLink1Description: https://datasheet.ciiva.com/1967/7377-1967658.pdf?src-supplier=Digi-Key; Supplier Part Number 1: 584-C2950ITS8-2TRPBF; LCSC Part Number: C683746; Item Type: IC
footprint TSOT-23-8
pins: 1 VIN, 2 ~{PB}, 3 ONT, 4 GND, 5 ~{INT}, 6 ~{EN}, 7 OFFT, 8 ~{KILL}

## LTC4010CFE#PBF
designator U?
IC BATT CHG MULTI 1-16C 16TSSOP; Manufacturer: Analog Devices / Linear Technology; Manufacturer Part Number: LTC4010CFE#PBF; Number of Cells: 16; Min Supply Voltage: 4.5V; Max Supply Voltage: 34V; Max Output current: 2A; Max Output Voltage: 4.8V; Max Charge Current: 4A; Supplier: Mouser; Supplier Part Number: 584-LTC4010CFE#PBF; RoHS: Yes; Item Type: IC; Stock: 18708; Pricing: 1=11.41, 10=10.48, 50=10.05, 100=8.65, 1000=7.22, 10000=7.21 (USD); Case/Package: TSSOP; Pins: 16; Min Operating Temperature: 0°C; Max Operating Temperature: 85°C; Package Quantity: 95; Packaging: Rail/Tube; Min Input Voltage: 4.5V; Min Output Voltage: 4.5V; Termination: SMD/SMT; Series: -; Length: 5.1mm; Width: 4.5mm; Height: 0.95mm; Radiation Hardening: No; Reach SVHC Compliant: No; Lead Free: Lead Free; RoHS Compliant: Yes; ComponentLink1URL: https://datasheet.ciiva.com/14093/drlinear-batterie-lade-ic-ltc14010-en-14093937.pdf?src-supplier=Distrelec; ComponentLink1Description: https://datasheet.ciiva.com/14093/drlinear-batterie-lade-ic-ltc14010-en-14093937.pdf?src-supplier=Distrelec; ComponentLink2URL: https://datasheet.ciiva.com/25627/0900766b810edb64-25627723.pdf?src-supplier=Rs; ComponentLink2Description: https://datasheet.ciiva.com/25627/0900766b810edb64-25627723.pdf?src-supplier=Rs; ComponentLink3URL: https://datasheet.ciiva.com/15114/getdatasheetpartid-136155-15114456.pdf?src-supplier=Verical; ComponentLink3Description: https://datasheet.ciiva.com/15114/getdatasheetpartid-136155-15114456.pdf?src-supplier=Verical; ComponentLink4URL: https://datasheet.ciiva.com/19478/1759060-19478598.pdf?src-supplier=Jameco; ComponentLink4Description: https://datasheet.ciiva.com/19478/1759060-19478598.pdf?src-supplier=Jameco; ComponentLink5URL: https://datasheet.ciiva.com/1934/6917-1934212.pdf?src-supplier=Digikey; ComponentLink5Description: https://datasheet.ciiva.com/1934/6917-1934212.pdf?src-supplier=Digikey; ComponentLink6URL: https://datasheet.ciiva.com/1490/1675706-1490082.pdf?src-supplier=Element14; ComponentLink6Description: https://datasheet.ciiva.com/1490/1675706-1490082.pdf?src-supplier=Element14; ComponentLink7URL: https://datasheet.ciiva.com/1137/1675706-1137371.pdf?src-supplier=Element14; ComponentLink7Description: https://datasheet.ciiva.com/1137/1675706-1137371.pdf?src-supplier=Element14; ComponentLink8URL: https://datasheet.ciiva.com/1139/1675706-1139885.pdf?src-supplier=Farnell; ComponentLink8Description: https://datasheet.ciiva.com/1139/1675706-1139885.pdf?src-supplier=Farnell; ComponentLink9URL: https://datasheet.ciiva.com/1496/1675706-1496804.pdf?src-supplier=Farnell; ComponentLink9Description: https://datasheet.ciiva.com/1496/1675706-1496804.pdf?src-supplier=Farnell
footprint TSSOP-16-EP
pins: 1 FAULT#, 2 CHRG#, 3 CHEM, 4 GND, 5 VTEMP, 6 VCELL, 7 VCDIV, 8 TIMER, 9 SENSE, 10 BAT, 11 INTVDD, 12 BGATE, 13 PGND, 14 TGATE, 15 VCC, 16 READY#, 17 EP

## LTC4015EUHF#PBF
designator U?
IC BATT CHG MULT-CHEM 2CEL 38QFN; Manufacturer: Analog Devices / Linear Technology; Manufacturer Part Number: LTC4015EUHF#PBF; Number of Cells: 2; Max Supply Voltage: 35V; Interface: I2C; Max Charge Current: 20A; Fault Protection: Over Temperature; Supplier 1: Mouser; RoHS: Yes; Category: Battery Management; Stock 1: 4617; Pricing 1: 1=13.35000, 10=12.28000, 50=11.77000, 100=11.77000, 1000=10.36000, 10000=10.36000 (USD); Case/Package: QFN; Number of Pins: 38; Min Operating Temperature: -40°C; Max Operating Temperature: 125°C; Packaging: Rail/Tube; Series: PowerPath™; Reach SVHC Compliant: Yes; RoHS Compliant: Yes; ComponentLink1URL: http://www.farnell.com/datasheets/2300511.pdf?src-supplier=Farnell; ComponentLink1Description: http://www.farnell.com/datasheets/2300511.pdf?src-supplier=Farnell; ComponentLink2URL: http://www.analog.com/media/en/technical-documentation/data-sheets/4015fb.pdf?src-supplier=Digi-Key; ComponentLink2Description: http://www.analog.com/media/en/technical-documentation/data-sheets/4015fb.pdf?src-supplier=Digi-Key; ComponentLink3URL: http://www.farnell.com/datasheets/2034976.pdf?src-supplier=Element14; ComponentLink3Description: http://www.farnell.com/datasheets/2034976.pdf?src-supplier=Element14; Supplier Part Number 1: 584-LTC4015EUHF#PBF; Item Type: IC; LCSC Part Number: C580823
footprint 38-QFN (5x7)
footprint 38-QFN (5x7)
pins: 1 CELLS1, 2 CELLS2, 3 DVCC, 4 SCL, 5 SDA, 6 ~{SMBAǐERT}, 7 SGND, 8 UVCLFB, 9 VC, 10 RT, 11 NTC, 12 NTCBIAS, 13 EQ, 14 GND, 15 CSPM5, 16 CCREFM, 17 CCREFP, 18 BATSENS, 19 CSN, 20 CSP, 21 MPPT, 22 2P5VCC, 23 SW, 24 TG, 25 BOOST, 26 BG, 27 DRVCC, 28 INTVCC, 29 OUTFET, 30 SYSM5, 31 SYS, 32 CLN, 33 CLP, 34 INFET, 35 VIN, 36 CHEM0, 37 CHEM1, 38 CELLS0, 39 GND

## LTC4041EUFD#PBF
designator U?
IC BATT PWR MGMT MULTI 1C 24QFN; Manufacturer: Analog Devices / Linear Technology; Manufacturer Part Number: LTC4041EUFD#PBF; Max Supply Voltage: 5.5V; Min Supply Voltage: 2.9V; Number of Cells: 2NUMBER; Number of Outputs: 1NUMBER; Output Current: 2.5A; Supplier: Mouser; LCSC Part Number: C3151895; RoHS: Yes; Item Type: IC; Stock: 15485; Pricing: 1=9.86, 10=7.01, 50=6.22, 100=4.91, 1000=4.43, 10000=4.43 (USD); Pins: 24NUMBER; Min Operating Temperature: -40°C; Max Operating Temperature: 125°C; Height: 800um; ComponentLink1URL: http://www.analog.com/media/en/technical-documentation/data-sheets/LTC4041.pdf?src-supplier=Digikey; ComponentLink1Description: http://www.analog.com/media/en/technical-documentation/data-sheets/LTC4041.pdf?src-supplier=Digikey; ComponentLink2URL: https://datasheet.octopart.com/LTC4041EUFD%23PBF-Analog-Devices-datasheet-138896410.pdf?src-supplier=Element14; ComponentLink2Description: https://datasheet.octopart.com/LTC4041EUFD%23PBF-Analog-Devices-datasheet-138896410.pdf?src-supplier=Element14
footprint 24-QFN (4x5)
pins: 1 VSYS, 2 PROG, 3 IMON, 4 ~{CHGEN}, 5 ~{BSTEN}, 6 VIN, 7 CLN, 8 ~{CAPFLT}, 9 BAL, 10 RSTFB, 11 SYSGD, 12 CAPFB, 13 CAPGD, 14 ~{PFO}, 15 IGATE, 16 OVSNS, 17 CPF, 18 BSTFB, 19 PFI, 20 CAPSEL, 21 SW, 22 SW, 23 SCAP, 24 VSYS, 25 GND

## LTC4121EUD#TRPBF
designator U?
IC BATT CHG MULTI-CHEM 16QFN; Manufacturer: Analog Devices / Linear Technology; Manufacturer Part Number: LTC4121EUD#TRPBF; Supplier: Mouser; LCSC Part Number: C687336; RoHS: Yes; Item Type: IC; Stock: 3824; Pricing: 1=8.92, 10=6.01, 50=5.25, 100=4.39, 1000=3.93, 10000=3.85 (USD); ComponentLink1URL: https://datasheet.octopart.com/LTC4121EUD%23TRPBF-Analog-Devices-datasheet-81464084.pdf?src-supplier=Element14; ComponentLink1Description: https://datasheet.octopart.com/LTC4121EUD%23TRPBF-Analog-Devices-datasheet-81464084.pdf?src-supplier=Element14; ComponentLink2URL: http://www.linear.com/docs/45157?src-supplier=Digikey; ComponentLink2Description: http://www.linear.com/docs/45157?src-supplier=Digikey
footprint 16-QFN (3x3).
pins: 1 INTVcc, 2 BOOST, 3 IN, 4 SW, 5 GND, 6 MPPT, 7 FREQ, 8 CHGSNS, 9 BAT, 10 FB, 11 FBG, 12 NTC, 13 PROG, 14 CHRG#, 15 FAULT#, 16 RUN, 17 GND

## LTC4359CMS8#PBF
designator U?
IC OR CTRLR N+1 8MSOP; Manufacturer: Analog Devices / Linear Technology; Manufacturer Part Number: LTC4359CMS8#PBF; Max Supply Voltage: 80V; Max Output Current: 180mA; Min Supply Voltage: 4V; Turn-On Delay Time: 200us; Turn-Off Delay Time: 300ns; Operating Supply Current: 150uA; Number of Drivers: 1; Supplier 1: Mouser; RoHS: Yes; Item Type: IC; Stock 1: 57; Pricing 1: 1=4.95000, 10=4.44000, 50=4.19000, 100=3.63000, 1000=3.09000, 10000=3.09000 (USD); Case/Package: MSOP; Number of Pins: 8; Min Operating Temperature: 0°C; Max Operating Temperature: 70°C; Package Quantity: 50; Packaging: Rail/Tube; Lead Free: Lead Free; ComponentLink1URL: https://datasheet.ciiva.com/6609/4359fb-6609306.pdf?src-supplier=Digi-Key; ComponentLink1Description: https://datasheet.ciiva.com/6609/4359fb-6609306.pdf?src-supplier=Digi-Key; Supplier Part Number 1: 584-LTC4359CMS8#PBF
footprint MSOP-8
pins: 1 GATE, 2 SOURCE, 3 NC, 4 IN, 5 ~{SHDN}, 6 VSS, 7 NC, 8 OUT

## LTC4359HDCB#TRPBF
designator U?
IC OR CTRLR N+1 6DFN; Manufacturer: Analog Devices / Linear Technology; Manufacturer Part Number: LTC4359HDCB#TRPBF; Supplier: Mouser; LCSC Part Number: C688238; RoHS: Yes; Item Type: IC; Stock: 1133; Pricing: 1=9.31, 10=6.3, 50=5.51, 100=4.62, 1000=4.17, 10000=4.16 (USD); ComponentLink1URL: https://datasheet.ciiva.com/6609/4359fb-6609308.pdf?src-supplier=Digikey; ComponentLink1Description: https://datasheet.ciiva.com/6609/4359fb-6609308.pdf?src-supplier=Digikey
footprint DFN-6-EP(2x3)
pins: 1 OUT, 2 GATE, 3 SOURCE, 4 IN, 5 ~{SHDN}, 6 VSS, 7 EPAD

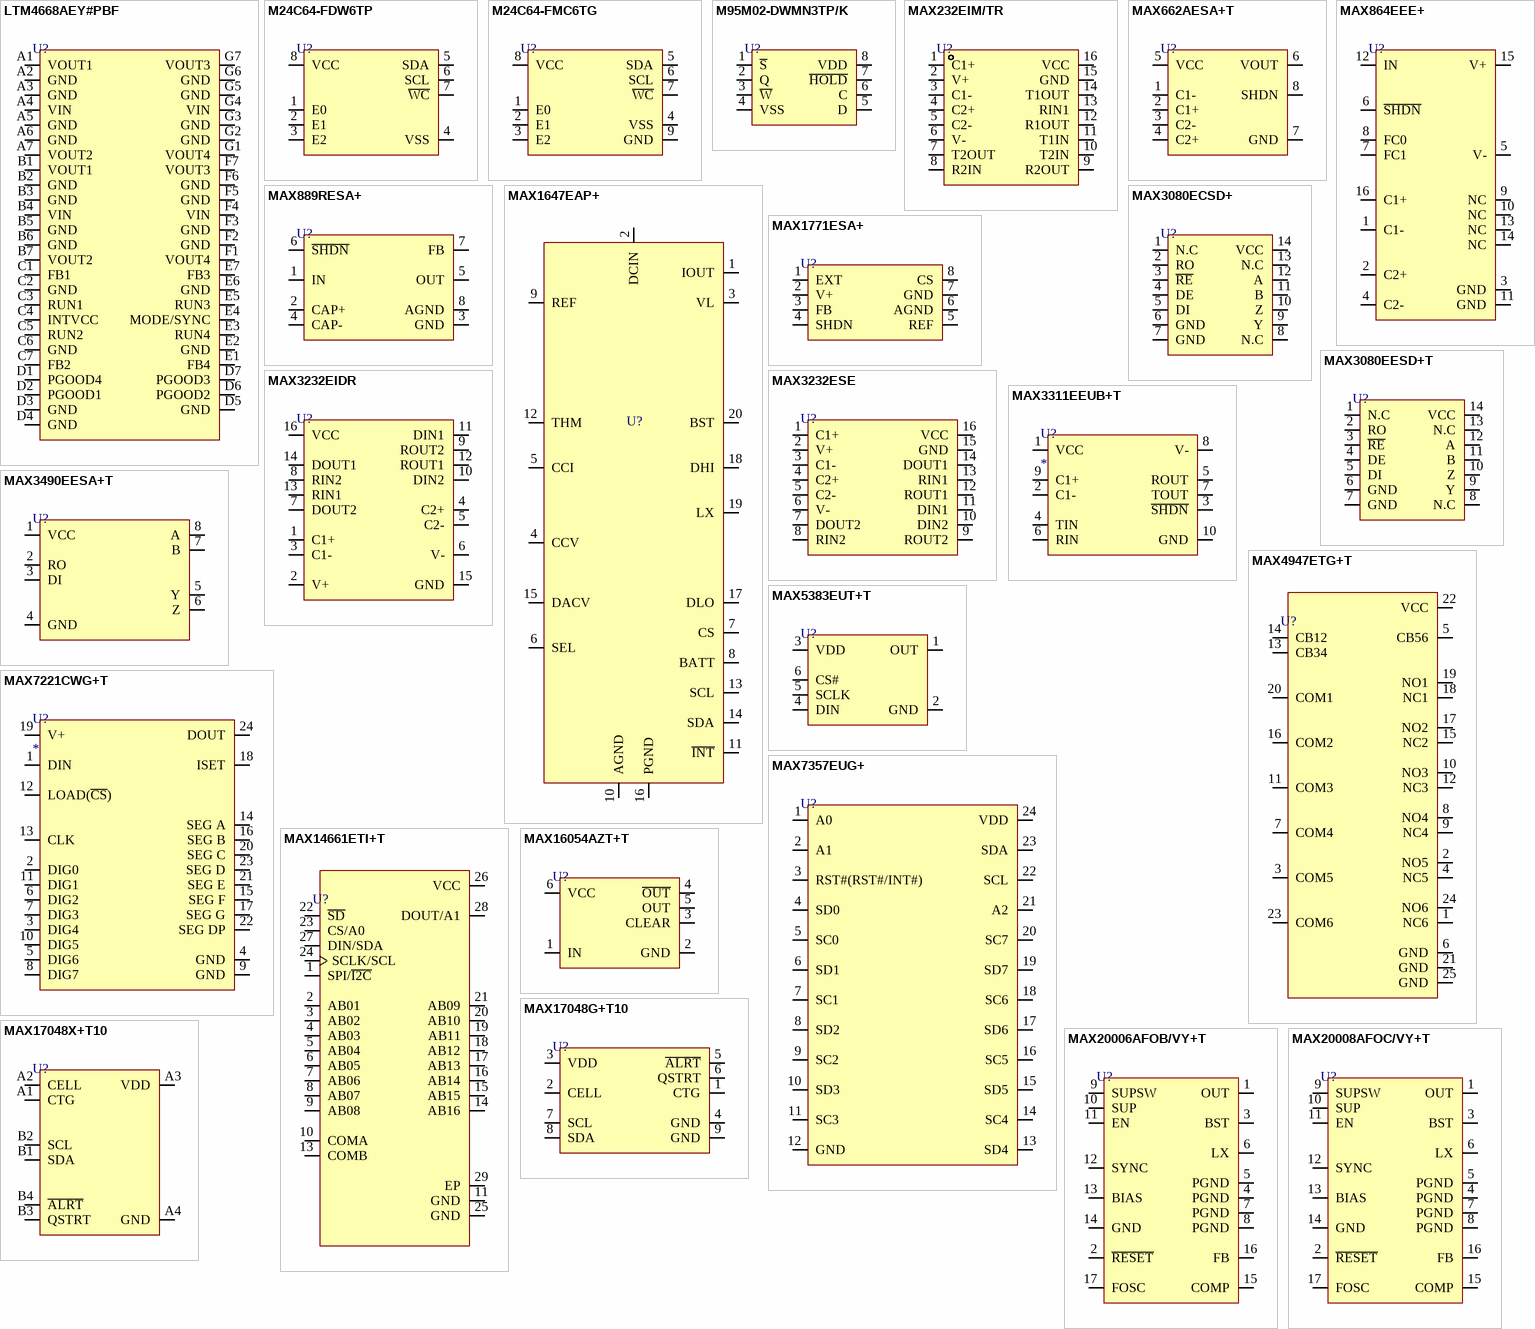
[diagram p10: symbols LTM4668AEY#PBF to MAX20008AFOC/VY+T]

## LTM4668AEY#PBF
designator U?
DC DC CNVRTR 4X0.6-5.5V; Manufacturer: Analog Devices; Manufacturer Part Number: LTM4668AEY#PBF; Manufacturer Lifecycle Status: PRODUCTION; Item Type: Board Mount Modules; Max Duty Cycle: 100%; Max Junction Temperature (Tj): 125°C; Max Supply Voltage: 17V; Min Supply Voltage: 2.7V; Nominal Supply Current: 390mA; Number of Outputs: 4; Output Current: 1.2A; Switching Frequency: 2.25MHz; Topology: Buck; Supplier: DigiKey; Supplier Part Number: 505-LTM4668AEY#PBF-ND; RoHS: Compliant; Stock: 299; Pricing: 1=17.67, 10=12.559, 260=9.6375 (USD); Height: 2.3mm; Lifecycle Status: Production; Max Operating Temperature: 125°C; Min Operating Temperature: -40°C; Pins: 49; Schedule B: 8542390000, 8542390000|8542390000, 8542390000|8542390000|8542390000|8542390000|8542390000|8542390000|8542390000|8542390000|8542390000|8542390000|8542390000|8542390000|8542390000|8542390000|8542390000|8542390000|8542390000|8542390000|8542390000|8542390000|8542390000|8542390000|8542390000|85; ComponentLink1URL: https://octopart.com:443/opatz8j6/c1?t=vbHTqUGtY6-k5e93LtCB3mijSR4wTdGxEpo1Glf8xJnXNp0RxEA-FTW98t8seuY8nOtoLxv0VM3pDTYNO0hLouL1XLHiCpp0bWy3mqUgOE6JVOvmWqXP9ooVK3Maq7pchWptY1NQj-RAhsNzEaw6J37kdBR-l-bAt_Hy5bR6zRiElEy8CCc8FTEXoima48kDZNYG7Zc_DrrRY6n_9AZw6H6WmvL8D1hmtYgJ_FT0jPJTklcZKMKT-M8u-LIZh380MkX4lLWmHqVWrVQI1KScprydAz8Nmxt1KcnQe2HjNIvFYiuCA9hdXCAnmQ&src-supplier=Analog+Devices; ComponentLink1Description: https://octopart.com:443/opatz8j6/c1?t=vbHTqUGtY6-k5e93LtCB3mijSR4wTdGxEpo1Glf8xJnXNp0RxEA-FTW98t8seuY8nOtoLxv0VM3pDTYNO0hLouL1XLHiCpp0bWy3mqUgOE6JVOvmWqXP9ooVK3Maq7pchWptY1NQj-RAhsNzEaw6J37kdBR-l-bAt_Hy5bR6zRiElEy8CCc8FTEXoima48kDZNYG7Zc_DrrRY6n_9AZw6H6WmvL8D1hmtYgJ_FT0jPJTklcZKMKT-M8u-LIZh380MkX4lLWmHqVWrVQI1KScprydAz8Nmxt1KcnQe2HjNIvFYiuCA9hdXCAnmQ&src-supplier=Analog+Devices; ComponentLink2URL: https://datasheet.octopart.com:443/LTM4668AEY%23PBF-Analog-Devices-datasheet-154633400.pdf?src-supplier=Upverter; ComponentLink2Description: https://datasheet.octopart.com:443/LTM4668AEY%23PBF-Analog-Devices-datasheet-154633400.pdf?src-supplier=Upverter; ComponentLink3URL: https://datasheet.octopart.com:443/LTM4668AEY%23PBF-Analog-Devices-datasheet-165517303.pdf?src-supplier=Newark; ComponentLink3Description: https://datasheet.octopart.com:443/LTM4668AEY%23PBF-Analog-Devices-datasheet-165517303.pdf?src-supplier=Newark; ComponentLink4URL: http://sigma.octopart.com:80/conflict_mineral_statement/Analog-Devices-company-33.pdf?src-supplier=Compliance+Statements; ComponentLink4Description: http://sigma.octopart.com:80/conflict_mineral_statement/Analog-Devices-company-33.pdf?src-supplier=Compliance+Statements; ComponentLink5URL: https://octopart.com:443/opatz8j6/c1?t=AoXmFVe7M9ZZJB1-BoHNPqEvTr7ihxmDPyvvPx73SiPZ4ZI_bcuOmg3wTAe_rPxL5XmMKdJ3vfpuzFmhZ3GdKpzUhbhp2SZWod1mTfI-Zg_AyS96Y6vANCZEN8Q1zD9UoXS6JbTXCfZpjhnVLK1jf89IJSRClqJ0uOpPGGOW2HW87xr4XJS4Ql2ixFG1rwY6pfuIS7mVeXNBZ1gO9Dx8CFIlz89zRrFvSRnMVwVgE4z812tl0wiu1xQKZc1k7h61stTJwPRzRfYECcs6uc9oW7qTPtFKYsAUJBGnl8qNv2ZPws_FYFGiJKu-gw&src-supplier=Compliance+Statements; ComponentLink5Description: https://octopart.com:443/opatz8j6/c1?t=AoXmFVe7M9ZZJB1-BoHNPqEvTr7ihxmDPyvvPx73SiPZ4ZI_bcuOmg3wTAe_rPxL5XmMKdJ3vfpuzFmhZ3GdKpzUhbhp2SZWod1mTfI-Zg_AyS96Y6vANCZEN8Q1zD9UoXS6JbTXCfZpjhnVLK1jf89IJSRClqJ0uOpPGGOW2HW87xr4XJS4Ql2ixFG1rwY6pfuIS7mVeXNBZ1gO9Dx8CFIlz89zRrFvSRnMVwVgE4z812tl0wiu1xQKZc1k7h61stTJwPRzRfYECcs6uc9oW7qTPtFKYsAUJBGnl8qNv2ZPws_FYFGiJKu-gw&src-supplier=Compliance+Statements
footprint BGA-49
pins: A1 VOUT1, A2 GND, A3 GND, A4 VIN, A5 GND, A6 GND, A7 VOUT2, B1 VOUT1, B2 GND, B3 GND, B4 VIN, B5 GND, B6 GND, B7 VOUT2, C1 FB1, C2 GND, C3 RUN1, C4 INTVCC, C5 RUN2, C6 GND, C7 FB2, D1 PGOOD4, D2 PGOOD1, D3 GND, D4 GND, D5 GND, D6 PGOOD2, D7 PGOOD3, E1 FB4, E2 GND, E3 RUN4, E4 MODE/SYNC, E5 RUN3, E6 GND, E7 FB3, F1 VOUT4, F2 GND, F3 GND, F4 VIN, F5 GND, F6 GND, F7 VOUT3, G1 VOUT4, G2 GND, G3 GND, G4 VIN, G5 GND, G6 GND, G7 VOUT3

## M24C64-FDW6TP
designator U?
IC EEPROM 64KBIT I2C 1MHZ 8TSSOP; Manufacturer: STMicroelectronics; Manufacturer Part Number: M24C64-FDW6TP; Package: TSSOP-8; LCSC Part Number: C222148; Item Type: IC; ComponentLink1Description: LCSC; ComponentLink1URL: https://www.lcsc.com/product-detail/EEPROM_STMicroelectronics-M24C64-FDW6TP_C222148.html; Supplier: Digikey; Supplier Part Number: 497-15760-2-ND; RoHS: Yes; Category: EEPROM; Stock: 12000; Pricing: 4000=0.23401, 8000=0.22895, 12000=0.22493, 28000=0.21957 (USD); ComponentLink2URL: https://datasheet.ciiva.com/26942/getdatasheetpartid-785735-26942181.pdf?src-supplier=Verical; ComponentLink2Description: https://datasheet.ciiva.com/26942/getdatasheetpartid-785735-26942181.pdf?src-supplier=Verical; ComponentLink3URL: https://datasheet.ciiva.com/6617/cd00259166-6617416.pdf?src-supplier=Digikey; ComponentLink3Description: https://datasheet.ciiva.com/6617/cd00259166-6617416.pdf?src-supplier=Digikey
footprint 8-TSSOP (IC SENSOR THERMAL 3.0V 8TSSOP)
pins: 1 E0, 2 E1, 3 E2, 4 VSS, 5 SDA, 6 SCL, 7 ~{WC}, 8 VCC

## M24C64-FMC6TG
designator U?
IC EEPROM 64KBIT I2C 8UFDFPN; Manufacturer: STMicroelectronics; Manufacturer Part Number: M24C64-FMC6TG; Supplier: Mouser; Supplier Part Number: 511-M24C64-FMC6TG; RoHS: Yes; Category: EEPROM; Stock: 25767; Pricing: 1=0.41, 10=0.372, 50=0.372, 100=0.335, 1000=0.301, 10000=0.255 (USD); ComponentLink1URL: https://datasheet.ciiva.com/1911/cd00259166-1911984.pdf?src-supplier=Digi-Key; ComponentLink1Description: https://datasheet.ciiva.com/1911/cd00259166-1911984.pdf?src-supplier=Digi-Key; LCSC Part Number: C283446; Item Type: IC
footprint DFN-8-EP(2x3)
pins: 1 E0, 2 E1, 3 E2, 4 VSS, 5 SDA, 6 SCL, 7 ~{WC}, 8 VCC, 9 GND

## M95M02-DWMN3TP/K
designator U?
IC EEPROM 2MBIT SPI 10MHZ 8SOIC; Manufacturer: STMicroelectronics; Manufacturer Part Number: M95M02-DWMN3TP/K; Interface: SPI,Serial; Memory Size: 2Mb; Min Supply Voltage: 2.5V; Max Supply Voltage: 5.5V; Access Time-Max: 80ns; Supplier: Mouser; LCSC Part Number: C222181; RoHS: Yes; Item Type: IC; Stock: 9826; Pricing: 1=4.59, 10=3.76, 50=3.76, 100=3.59, 1000=3.17, 10000=2.93 (USD); Mounting Technology: Surface Mount; Case/Package: SOIC; Pins: 8; Min Operating Temperature: -40°C; Max Operating Temperature: 125°C; Packaging: Cut Tape; Memory Format: EEPROM; Series: Automotive, AEC-Q100; Length: 5mm; Width: 4mm; Height: 1.5mm; Lead Free: Lead Free; RoHS Compliant: Yes; ComponentLink1URL: http://www.farnell.com/datasheets/2374181.pdf?src-supplier=Farnell; ComponentLink1Description: http://www.farnell.com/datasheets/2374181.pdf?src-supplier=Farnell; ComponentLink2URL: https://datasheet.octopart.com/M95M02-DWMN3TP-K-STMicroelectronics-datasheet-34136857.pdf?src-supplier=Future+Electronics; ComponentLink2Description: https://datasheet.octopart.com/M95M02-DWMN3TP-K-STMicroelectronics-datasheet-34136857.pdf?src-supplier=Future+Electronics; ComponentLink3URL: http://www.farnell.com/datasheets/2374181.pdf?src-supplier=Newark; ComponentLink3Description: http://www.farnell.com/datasheets/2374181.pdf?src-supplier=Newark; ComponentLink4URL: http://www.st.com/content/ccc/resource/technical/document/datasheet/d4/20/53/1a/4b/a1/41/96/DM00132783.pdf/files/DM00132783.pdf/jcr:content/translations/en.DM00132783.pdf?src-supplier=Digikey; ComponentLink4Description: http://www.st.com/content/ccc/resource/technical/document/datasheet/d4/20/53/1a/4b/a1/41/96/DM00132783.pdf/files/DM00132783.pdf/jcr:content/translations/en.DM00132783.pdf?src-supplier=Digikey; ComponentLink5URL: http://www.farnell.com/datasheets/2374181.pdf?src-supplier=Mouser; ComponentLink5Description: http://www.farnell.com/datasheets/2374181.pdf?src-supplier=Mouser; ComponentLink6URL: http://www.farnell.com/datasheets/2374181.pdf?src-supplier=Rs; ComponentLink6Description: http://www.farnell.com/datasheets/2374181.pdf?src-supplier=Rs; ComponentLink7URL: http://www.farnell.com/datasheets/2374181.pdf?src-supplier=Avnet; ComponentLink7Description: http://www.farnell.com/datasheets/2374181.pdf?src-supplier=Avnet; ComponentLink8URL: http://www.farnell.com/datasheets/2374181.pdf?src-supplier=Rutronik; ComponentLink8Description: http://www.farnell.com/datasheets/2374181.pdf?src-supplier=Rutronik
footprint SOIC-8(0.154", 3.90mm Width)
pins: 1 ~{S}, 2 Q, 3 ~{W}, 4 VSS, 5 D, 6 C, 7 ~{HOLD}, 8 VDD

## MAX232EIM/TR
designator U?
140Kbps transceiver SOP-16 RS232 ICs ROHS; Manufacturer: HGSEMI; Manufacturer Part Number: MAX232EIM/TR; Item Type: IC; Package: SOP-16; LCSC Part Number: C519083; ComponentLink1Description: LCSC; ComponentLink1URL: https://www.lcsc.com/product-detail/RS-span-style-background-color-ff0-232-span-ICs_HGSEMI-MAX232EIM-TR_C519083.html
footprint SOP-16
pins: 1 C1+, 2 V+, 3 C1-, 4 C2+, 5 C2-, 6 V-, 7 T2OUT, 8 R2IN, 9 R2OUT, 10 T2IN, 11 T1IN, 12 R1OUT, 13 RIN1, 14 T1OUT, 15 GND, 16 VCC

## MAX662AESA+T
designator U?
IC REG CHRG PUMP 12V 30MA 8SOIC; Manufacturer: Maxim; Manufacturer Part Number: MAX662AESA+T; Supplier: Mouser; Supplier Part Number: 700-MAX662AESAT; RoHS: Yes; Item Type: IC; Stock: 14227; Pricing: 1=7.55, 10=6.82, 50=6.51, 100=5.65, 1000=4.34, 10000=4.34 (USD); ComponentLink1URL: https://datasheet.ciiva.com/3216/max662a-3216150.pdf?src-supplier=Avnet; ComponentLink1Description: https://datasheet.ciiva.com/3216/max662a-3216150.pdf?src-supplier=Avnet; ComponentLink2URL: https://datasheet.ciiva.com/3216/max662a-3216729.pdf?src-supplier=Avnet; ComponentLink2Description: https://datasheet.ciiva.com/3216/max662a-3216729.pdf?src-supplier=Avnet; ComponentLink3URL: https://datasheet.ciiva.com/2037/max662a-2037379.pdf?src-supplier=Digikey; ComponentLink3Description: https://datasheet.ciiva.com/2037/max662a-2037379.pdf?src-supplier=Digikey; LCSC Part Number: C2976348
footprint SOIC-8(0.154", 3.90mm Width)
pins: 1 C1-, 2 C1+, 3 C2-, 4 C2+, 5 VCC, 6 VOUT, 7 GND, 8 SHDN